# Altium footprint library MOLEX_104031-0811.PcbLib: 1 footprints
Each footprint in its own frame and in the unit in brackets; x right, y up, seen from the top. Pads: shape width x height; smd on the part's side, far side on the other; paste and mask are expansions set on the pad; w line width, h text height; cw(c..) or ccw(c..) is an arc to the next point about the centre after c.
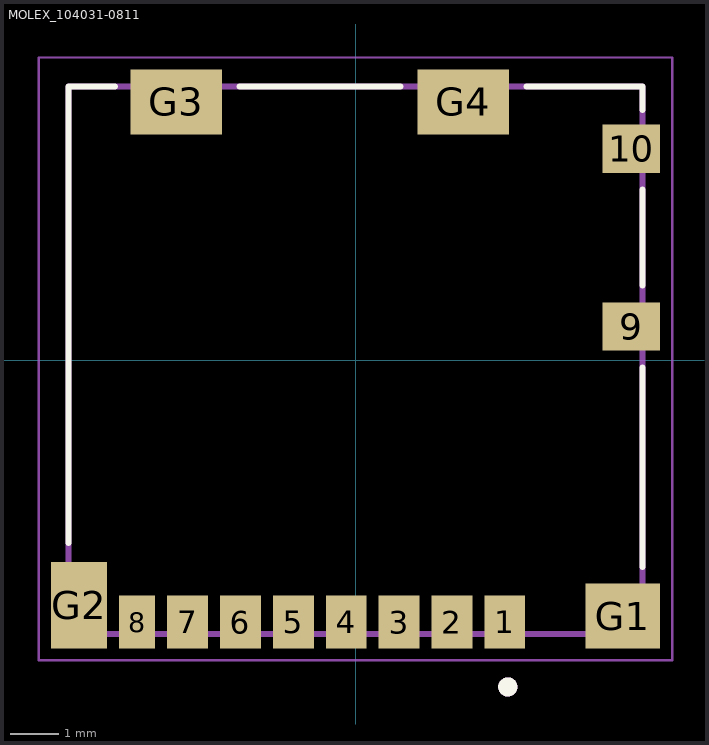
[diagram p0: the footprint, top view; thin cyan lines are the x and y axes]

## MOLEX_104031-0811 [mm]
height 1.57
pads (14):
  rect 0.85x1.1 smd: 1(3.105,-5.45) 2(2.005,-5.45) 3(0.905,-5.45) 4(-0.195,-5.45) 5(-1.295,-5.45) 6(-2.395,-5.45) 7(-3.495,-5.45)
  rect 0.75x1.1 smd: 8(-4.545,-5.45)
  rect 1.2x1 smd: 9(5.74,0.7) 10(5.74,4.4)
  rect 1.55x1.35 smd: G1(5.565,-5.325)
  rect 1.17x1.8 smd: G2(-5.755,-5.1)
  rect 1.9x1.35 smd: G3(-3.73,5.375) G4(2.24,5.375)
Top Overlay:
  circle w0.2: c3.168,-6.801 r0.1
  lines w0.127: -5.975,-3.806 -5.975,5.7 -5.003,5.7 ; -2.413,5.7 0.939,5.7 ; 3.556,5.7 5.975,5.7 5.975,5.211 ; 5.975,-4.3 5.975,-0.15 ; 5.975,1.55 5.975,3.55
Assembly Top:
  circle w0.2: c3.168,-6.801 r0.1
  lines w0.127: -5.975,-5.7 5.975,-5.7 5.975,5.7 -5.975,5.7 -5.975,-5.7
Courtyard Top:
  lines w0.05: -6.59,-6.25 6.59,-6.25 6.59,6.3 -6.59,6.3 -6.59,-6.25